# Altium footprint library Terminal_Blocks_Pluggable PCB_5.08mm.PcbLib: 299 footprints (part 18 of 19)
Each footprint in its own frame and in the unit in brackets; x right, y up, seen from the top. Pads: shape width x height; smd on the part's side, far side on the other; paste and mask are expansions set on the pad; w line width, h text height; cw(c..) or ccw(c..) is an arc to the next point about the centre after c.
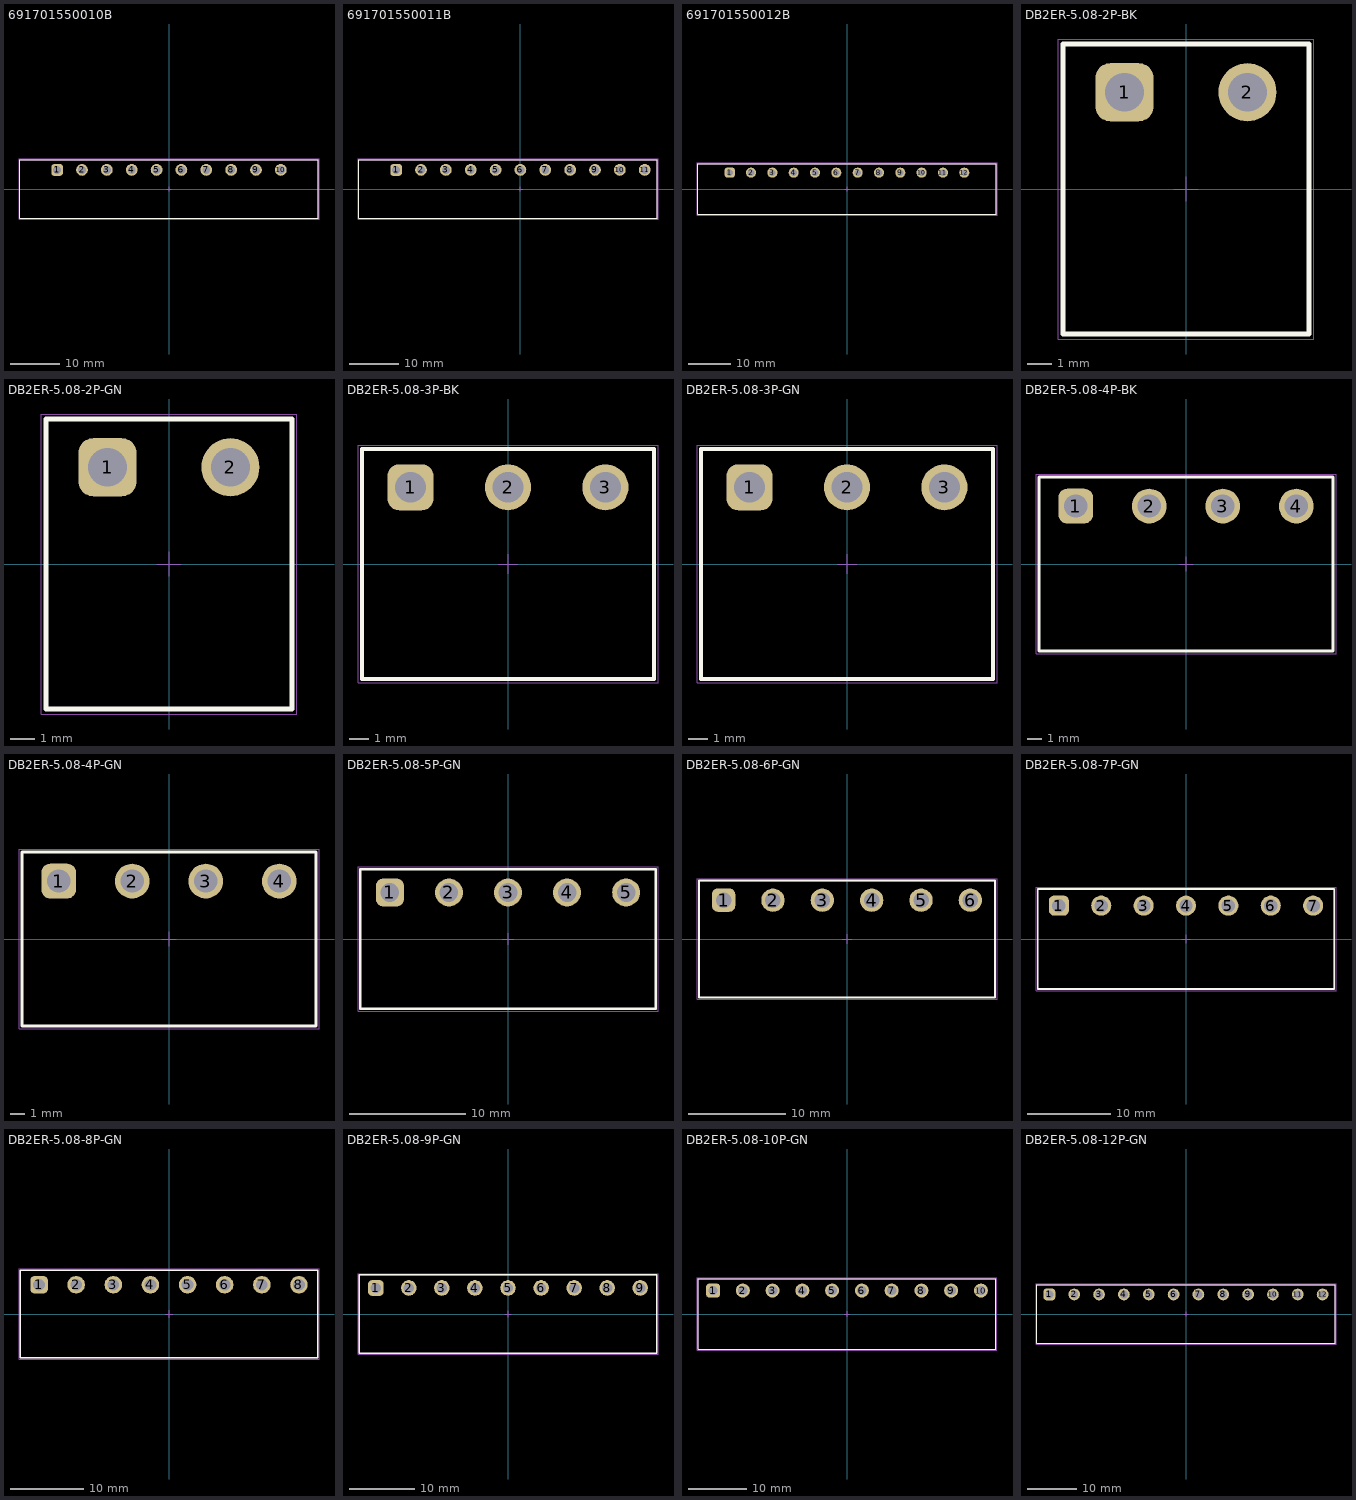
[diagram p17: the footprints below, top view; thin cyan lines are the x and y axes]

## 691701550010B [mm] "THR - 5,08mm - PCB Horizontal Flange - 10p"
height 8.4
pads (10):
  rrect50% 2.4x2.4 hole 1.6: 1(-22.86,3.9)
  round 2.4 hole 1.6: 2(-17.78,3.9) 3(-12.7,3.9) 4(-7.62,3.9) 5(-2.54,3.9) 6(2.54,3.9) 7(7.62,3.9) 8(12.7,3.9) 9(17.78,3.9) 10(22.86,3.9)
Top Overlay:
  lines w0.2: -30.46,-6 -30.46,6 30.46,6 30.46,-6 -30.46,-6
Top Designator:
  text ".Designator" at -7.498,-0.5 h1.5
Top Component Outline:
  lines w0.1: -30.46,-6 30.46,-6 30.46,6 -30.46,6 -30.46,-6
Top 3D Body:
  lines w0.1: -30.46,-6 -30.46,6 30.46,6 30.46,-6 -30.46,-6
Top Courtyard:
  lines w0.05: -30.66,-6.2 -30.66,6.2 30.66,6.2 30.66,-6.2 -30.66,-6.2
Top Component Center:
  lines w0.05: -0.5,0 0.5,0 ; 0,-0.5 0,0.5
3D body "691701550010B.stp": height 8.55, standoff -2.75, extent -30.48,-6 30.48,6

## 691701550011B [mm] "THR - 5,08mm - PCB Horizontal Flange - 11p"
height 8.4
pads (11):
  rrect50% 2.4x2.4 hole 1.6: 1(-25.4,3.9)
  round 2.4 hole 1.6: 2(-20.32,3.9) 3(-15.24,3.9) 4(-10.16,3.9) 5(-5.08,3.9) 6(0,3.9) 7(5.08,3.9) 8(10.16,3.9) 9(15.24,3.9) 10(20.32,3.9) 11(25.4,3.9)
Top Overlay:
  lines w0.2: -33,-6 -33,6 27.92,6 27.92,-6 -33,-6
Top Designator:
  text ".Designator" at -7.498,-0.5 h1.5
Top Component Outline:
  lines w0.1: -33,-6 27.92,-6 27.92,6 -33,6 -33,-6
Top 3D Body:
  lines w0.1: -33,-6 -33,6 27.92,6 27.92,-6 -33,-6
Top Courtyard:
  lines w0.05: -33.2,-6.2 -33.2,6.2 28.12,6.2 28.12,-6.2 -33.2,-6.2
Top Component Center:
  lines w0.05: -0.5,0 0.5,0 ; 0,-0.5 0,0.5
3D body "691701550010B.stp": height 8.55, standoff -2.75, extent -33.02,-6 27.94,6

## 691701550012B [mm] "THR - 5,08mm - PCB Horizontal Flange - 12p"
height 8.4
pads (12):
  rrect50% 2.4x2.4 hole 1.6: 1(-27.94,3.9)
  round 2.4 hole 1.6: 2(-22.86,3.9) 3(-17.78,3.9) 4(-12.7,3.9) 5(-7.62,3.9) 6(-2.54,3.9) 7(2.54,3.9) 8(7.62,3.9) 9(12.7,3.9) 10(17.78,3.9) 11(22.86,3.9) 12(27.94,3.9)
Top Overlay:
  lines w0.2: -35.54,-6 35.54,-6 35.54,6 -35.54,6 -35.54,-6
Top Designator:
  text ".Designator" at -7.498,-0.5 h1.5
Top Component Outline:
  lines w0.1: -35.54,-6 -35.54,6 35.54,6 35.54,-6 -35.54,-6
Top 3D Body:
  lines w0.1: -35.54,-6 35.54,-6 35.54,6 -35.54,6 -35.54,-6
Top Courtyard:
  lines w0.05: -35.74,-6.2 35.74,-6.2 35.74,6.2 -35.74,6.2 -35.74,-6.2
Top Component Center:
  lines w0.05: -0.5,0 0.5,0 ; 0,-0.5 0,0.5
3D body "691701550012B.stp": height 8.55, standoff -2.75, extent -35.56,-6 35.56,6

## DB2ER-5.08-2P-BK [mm] "5,08mm - PCB Headers - Horizontal - Opened ends - 02p"
height 8.5
pads (2):
  rrect50% 2.4x2.4 hole 1.6: 1(-2.54,4)
  round 2.4 hole 1.6: 2(2.54,4)
Top Overlay:
  lines w0.2: -5.08,-6 5.08,-6 5.08,6 -5.08,6 -5.08,-6
Top Designator:
  text ".Designator" at -7.498,-0.5 h1.5
Top Component Outline:
  lines w0.1: -5.08,-6 -5.08,6 5.08,6 5.08,-6 -5.08,-6
Top 3D Body:
  lines w0.1: -5.08,-6 5.08,-6 5.08,6 -5.08,6 -5.08,-6
Top Courtyard:
  lines w0.05: -5.28,-6.2 5.28,-6.2 5.28,6.2 -5.28,6.2 -5.28,-6.2
Top Component Center:
  lines w0.05: -0.5,0 0.5,0 ; 0,-0.5 0,0.5
3D body "db2er-508-2p.step": height 8.6, standoff -3.4, extent -5.1,-6 5.06,6

## DB2ER-5.08-2P-GN [mm] "5,08mm - PCB Headers - Horizontal - Opened ends - 02p"
height 8.5
pads (2):
  rrect50% 2.4x2.4 hole 1.6: 1(-2.54,4)
  round 2.4 hole 1.6: 2(2.54,4)
Top Overlay:
  lines w0.2: -5.08,-6 5.08,-6 5.08,6 -5.08,6 -5.08,-6
Top Designator:
  text ".Designator" at -7.498,-0.5 h1.5
Top Component Outline:
  lines w0.1: -5.08,-6 -5.08,6 5.08,6 5.08,-6 -5.08,-6
Top 3D Body:
  lines w0.1: -5.08,-6 5.08,-6 5.08,6 -5.08,6 -5.08,-6
Top Courtyard:
  lines w0.05: -5.28,-6.2 5.28,-6.2 5.28,6.2 -5.28,6.2 -5.28,-6.2
Top Component Center:
  lines w0.05: -0.5,0 0.5,0 ; 0,-0.5 0,0.5
3D body "691312510002.stp": height 8.55, standoff -3.45, extent -5.08,-6 5.08,6

## DB2ER-5.08-3P-BK [mm] "5,08mm - PCB Headers - Horizontal - Opened ends - 03p"
height 8.5
pads (3):
  rrect50% 2.4x2.4 hole 1.6: 1(-5.08,4)
  round 2.4 hole 1.6: 2(0,4) 3(5.08,4)
Top Overlay:
  lines w0.2: -7.62,-6 -7.62,6 7.62,6 7.62,-6 -7.62,-6
Top Designator:
  text ".Designator" at -7.498,-0.5 h1.5
Top Component Outline:
  lines w0.1: -7.62,-6 7.62,-6 7.62,6 -7.62,6 -7.62,-6
Top 3D Body:
  lines w0.1: -7.62,-6 -7.62,6 7.62,6 7.62,-6 -7.62,-6
Top Courtyard:
  lines w0.05: -7.82,-6.2 -7.82,6.2 7.82,6.2 7.82,-6.2 -7.82,-6.2
Top Component Center:
  lines w0.05: -0.5,0 0.5,0 ; 0,-0.5 0,0.5
3D body "db2er-508-3p.step": height 8.7, standoff -3.3, extent -7.64,-6 7.6,6

## DB2ER-5.08-3P-GN [mm] "5,08mm - PCB Headers - Horizontal - Opened ends - 03p"
height 8.5
pads (3):
  rrect50% 2.4x2.4 hole 1.6: 1(-5.08,4)
  round 2.4 hole 1.6: 2(0,4) 3(5.08,4)
Top Overlay:
  lines w0.2: -7.62,-6 7.62,-6 7.62,6 -7.62,6 -7.62,-6
Top Designator:
  text ".Designator" at -7.498,-0.5 h1.5
Top Component Outline:
  lines w0.1: -7.62,-6 -7.62,6 7.62,6 7.62,-6 -7.62,-6
Top 3D Body:
  lines w0.1: -7.62,-6 7.62,-6 7.62,6 -7.62,6 -7.62,-6
Top Courtyard:
  lines w0.05: -7.82,-6.2 7.82,-6.2 7.82,6.2 -7.82,6.2 -7.82,-6.2
Top Component Center:
  lines w0.05: -0.5,0 0.5,0 ; 0,-0.5 0,0.5
3D body "691312510003.stp": height 8.55, standoff -3.45, extent -7.62,-6 7.62,6

## DB2ER-5.08-4P-BK [mm] "5,08mm - PCB Headers - Horizontal - Opened ends - 04p"
height 8.5
pads (4):
  rrect50% 2.4x2.4 hole 1.6: 1(-7.62,4)
  round 2.4 hole 1.6: 2(-2.54,4) 3(2.54,4) 4(7.62,4)
Top Overlay:
  lines w0.2: -10.16,-6 10.16,-6 10.16,6 -10.16,6 -10.16,-6
Top Designator:
  text ".Designator" at -7.498,-0.5 h1.5
Top Component Outline:
  lines w0.1: -10.16,-6 -10.16,6 10.16,6 10.16,-6 -10.16,-6
Top 3D Body:
  lines w0.1: -10.16,-6 10.16,-6 10.16,6 -10.16,6 -10.16,-6
Top Courtyard:
  lines w0.05: -10.36,-6.2 10.36,-6.2 10.36,6.2 -10.36,6.2 -10.36,-6.2
Top Component Center:
  lines w0.05: -0.5,0 0.5,0 ; 0,-0.5 0,0.5
3D body "db2er-508-4p.step": height 8.7, standoff -3.3, extent -10.12,-6 10.2,6

## DB2ER-5.08-4P-GN [mm] "5,08mm - PCB Headers - Horizontal - Opened ends - 04p"
height 8.5
pads (4):
  rrect50% 2.4x2.4 hole 1.6: 1(-7.62,4)
  round 2.4 hole 1.6: 2(-2.54,4) 3(2.54,4) 4(7.62,4)
Top Overlay:
  lines w0.2: -10.16,-6 -10.16,6 10.16,6 10.16,-6 -10.16,-6
Top Designator:
  text ".Designator" at -7.498,-0.5 h1.5
Top Component Outline:
  lines w0.1: -10.16,-6 10.16,-6 10.16,6 -10.16,6 -10.16,-6
Top 3D Body:
  lines w0.1: -10.16,-6 -10.16,6 10.16,6 10.16,-6 -10.16,-6
Top Courtyard:
  lines w0.05: -10.36,-6.2 -10.36,6.2 10.36,6.2 10.36,-6.2 -10.36,-6.2
Top Component Center:
  lines w0.05: -0.5,0 0.5,0 ; 0,-0.5 0,0.5
3D body "691312510004.stp": height 8.55, standoff -3.45, extent -10.16,-6 10.16,6

## DB2ER-5.08-5P-GN [mm] "5,08mm - PCB Headers - Horizontal - Opened ends - 05p"
height 8.5
pads (5):
  rrect50% 2.4x2.4 hole 1.6: 1(-10.16,4)
  round 2.4 hole 1.6: 2(-5.08,4) 3(0,4) 4(5.08,4) 5(10.16,4)
Top Overlay:
  lines w0.2: -12.7,-6 12.7,-6 12.7,6 -12.7,6 -12.7,-6
Top Designator:
  text ".Designator" at -7.498,-0.5 h1.5
Top Component Outline:
  lines w0.1: -12.7,-6 -12.7,6 12.7,6 12.7,-6 -12.7,-6
Top 3D Body:
  lines w0.1: -12.7,-6 12.7,-6 12.7,6 -12.7,6 -12.7,-6
Top Courtyard:
  lines w0.05: -12.9,-6.2 12.9,-6.2 12.9,6.2 -12.9,6.2 -12.9,-6.2
Top Component Center:
  lines w0.05: -0.5,0 0.5,0 ; 0,-0.5 0,0.5
3D body "691312510005.stp": height 8.55, standoff -3.45, extent -12.7,-6 12.7,6

## DB2ER-5.08-6P-GN [mm] "5,08mm - PCB Headers - Horizontal - Opened ends - 06p"
height 8.5
pads (6):
  rrect50% 2.4x2.4 hole 1.6: 1(-12.7,4)
  round 2.4 hole 1.6: 2(-7.62,4) 3(-2.54,4) 4(2.54,4) 5(7.62,4) 6(12.7,4)
Top Overlay:
  lines w0.2: -15.24,-6 -15.24,6 15.24,6 15.24,-6 -15.24,-6
Top Designator:
  text ".Designator" at -7.498,-0.5 h1.5
Top Component Outline:
  lines w0.1: -15.24,-6 15.24,-6 15.24,6 -15.24,6 -15.24,-6
Top 3D Body:
  lines w0.1: -15.24,-6 -15.24,6 15.24,6 15.24,-6 -15.24,-6
Top Courtyard:
  lines w0.05: -15.44,-6.2 -15.44,6.2 15.44,6.2 15.44,-6.2 -15.44,-6.2
Top Component Center:
  lines w0.05: -0.5,0 0.5,0 ; 0,-0.5 0,0.5
3D body "691312510006.stp": height 8.55, standoff -3.45, extent -15.24,-6 15.24,6

## DB2ER-5.08-7P-GN [mm] "5,08mm - PCB Headers - Horizontal - Opened ends - 07p"
height 8.5
pads (7):
  rrect50% 2.4x2.4 hole 1.6: 1(-15.24,4)
  round 2.4 hole 1.6: 2(-10.16,4) 3(-5.08,4) 4(0,4) 5(5.08,4) 6(10.16,4) 7(15.24,4)
Top Overlay:
  lines w0.2: -17.78,-6 -17.78,6 17.78,6 17.78,-6 -17.78,-6
Top Designator:
  text ".Designator" at -7.498,-0.5 h1.5
Top Component Outline:
  lines w0.1: -17.78,-6 17.78,-6 17.78,6 -17.78,6 -17.78,-6
Top 3D Body:
  lines w0.1: -17.78,-6 -17.78,6 17.78,6 17.78,-6 -17.78,-6
Top Courtyard:
  lines w0.05: -17.98,-6.2 -17.98,6.2 17.98,6.2 17.98,-6.2 -17.98,-6.2
Top Component Center:
  lines w0.05: -0.5,0 0.5,0 ; 0,-0.5 0,0.5
3D body "691312510007.stp": height 8.55, standoff -3.45, extent -17.78,-6 17.78,6

## DB2ER-5.08-8P-GN [mm] "5,08mm - PCB Headers - Horizontal - Opened ends - 08p"
height 8.5
pads (8):
  rrect50% 2.4x2.4 hole 1.6: 1(-17.78,4)
  round 2.4 hole 1.6: 2(-12.7,4) 3(-7.62,4) 4(-2.54,4) 5(2.54,4) 6(7.62,4) 7(12.7,4) 8(17.78,4)
Top Overlay:
  lines w0.2: -20.32,-6 20.32,-6 20.32,6 -20.32,6 -20.32,-6
Top Designator:
  text ".Designator" at -7.498,-0.5 h1.5
Top Component Outline:
  lines w0.1: -20.32,-6 -20.32,6 20.32,6 20.32,-6 -20.32,-6
Top 3D Body:
  lines w0.1: -20.32,-6 20.32,-6 20.32,6 -20.32,6 -20.32,-6
Top Courtyard:
  lines w0.05: -20.52,-6.2 20.52,-6.2 20.52,6.2 -20.52,6.2 -20.52,-6.2
Top Component Center:
  lines w0.05: -0.5,0 0.5,0 ; 0,-0.5 0,0.5
3D body "691312510008.stp": height 8.55, standoff -3.45, extent -20.32,-6 20.32,6

## DB2ER-5.08-9P-GN [mm] "5,08mm - PCB Headers - Horizontal - Opened ends - 09p"
height 8.5
pads (9):
  rrect50% 2.4x2.4 hole 1.6: 1(-20.32,4)
  round 2.4 hole 1.6: 2(-15.24,4) 3(-10.16,4) 4(-5.08,4) 5(0,4) 6(5.08,4) 7(10.16,4) 8(15.24,4) 9(20.32,4)
Top Overlay:
  lines w0.2: -22.86,-6 -22.86,6 22.86,6 22.86,-6 -22.86,-6
Top Designator:
  text ".Designator" at -7.498,-0.5 h1.5
Top Component Outline:
  lines w0.1: -22.86,-6 22.86,-6 22.86,6 -22.86,6 -22.86,-6
Top 3D Body:
  lines w0.1: -22.86,-6 -22.86,6 22.86,6 22.86,-6 -22.86,-6
Top Courtyard:
  lines w0.05: -23.06,-6.2 -23.06,6.2 23.06,6.2 23.06,-6.2 -23.06,-6.2
Top Component Center:
  lines w0.05: -0.5,0 0.5,0 ; 0,-0.5 0,0.5
3D body "691312510009.stp": height 8.55, standoff -3.45, extent -22.86,-6 22.86,6

## DB2ER-5.08-10P-GN [mm] "5,08mm - PCB Headers - Horizontal - Opened ends - 10p"
height 8.5
pads (10):
  rrect50% 2.4x2.4 hole 1.6: 1(-22.86,4)
  round 2.4 hole 1.6: 2(-17.78,4) 3(-12.7,4) 4(-7.62,4) 5(-2.54,4) 6(2.54,4) 7(7.62,4) 8(12.7,4) 9(17.78,4) 10(22.86,4)
Top Overlay:
  lines w0.2: -25.4,-6 25.4,-6 25.4,6 -25.4,6 -25.4,-6
Top Designator:
  text ".Designator" at -7.498,-0.5 h1.5
Top Component Outline:
  lines w0.1: -25.4,-6 -25.4,6 25.4,6 25.4,-6 -25.4,-6
Top 3D Body:
  lines w0.1: -25.4,-6 25.4,-6 25.4,6 -25.4,6 -25.4,-6
Top Courtyard:
  lines w0.05: -25.6,-6.2 25.6,-6.2 25.6,6.2 -25.6,6.2 -25.6,-6.2
Top Component Center:
  lines w0.05: -0.5,0 0.5,0 ; 0,-0.5 0,0.5
3D body "691312510010.stp": height 8.55, standoff -3.45, extent -25.4,-6 25.4,6

## DB2ER-5.08-12P-GN [mm] "5,08mm - PCB Headers - Horizontal - Opened ends - 12p"
height 8.5
pads (12):
  rrect50% 2.4x2.4 hole 1.6: 1(-27.94,4)
  round 2.4 hole 1.6: 2(-22.86,4) 3(-17.78,4) 4(-12.7,4) 5(-7.62,4) 6(-2.54,4) 7(2.54,4) 8(7.62,4) 9(12.7,4) 10(17.78,4) 11(22.86,4) 12(27.94,4)
Top Overlay:
  lines w0.2: -30.48,-6 30.48,-6 30.48,6 -30.48,6 -30.48,-6
Top Designator:
  text ".Designator" at -7.498,-0.5 h1.5
Top Component Outline:
  lines w0.1: -30.48,-6 -30.48,6 30.48,6 30.48,-6 -30.48,-6
Top 3D Body:
  lines w0.1: -30.48,-6 30.48,-6 30.48,6 -30.48,6 -30.48,-6
Top Courtyard:
  lines w0.05: -30.68,-6.2 30.68,-6.2 30.68,6.2 -30.68,6.2 -30.68,-6.2
Top Component Center:
  lines w0.05: -0.5,0 0.5,0 ; 0,-0.5 0,0.5
3D body "691312510012.stp": height 8.55, standoff -3.45, extent -30.48,-6 30.48,6